# Altium footprint library SamacSys.PcbLib: 1008 footprints (part 5 of 63)
Each footprint in its own frame and in the unit in brackets; x right, y up, seen from the top. Pads: shape width x height; smd on the part's side, far side on the other; paste and mask are expansions set on the pad; w line width, h text height; cw(c..) or ccw(c..) is an arc to the next point about the centre after c.
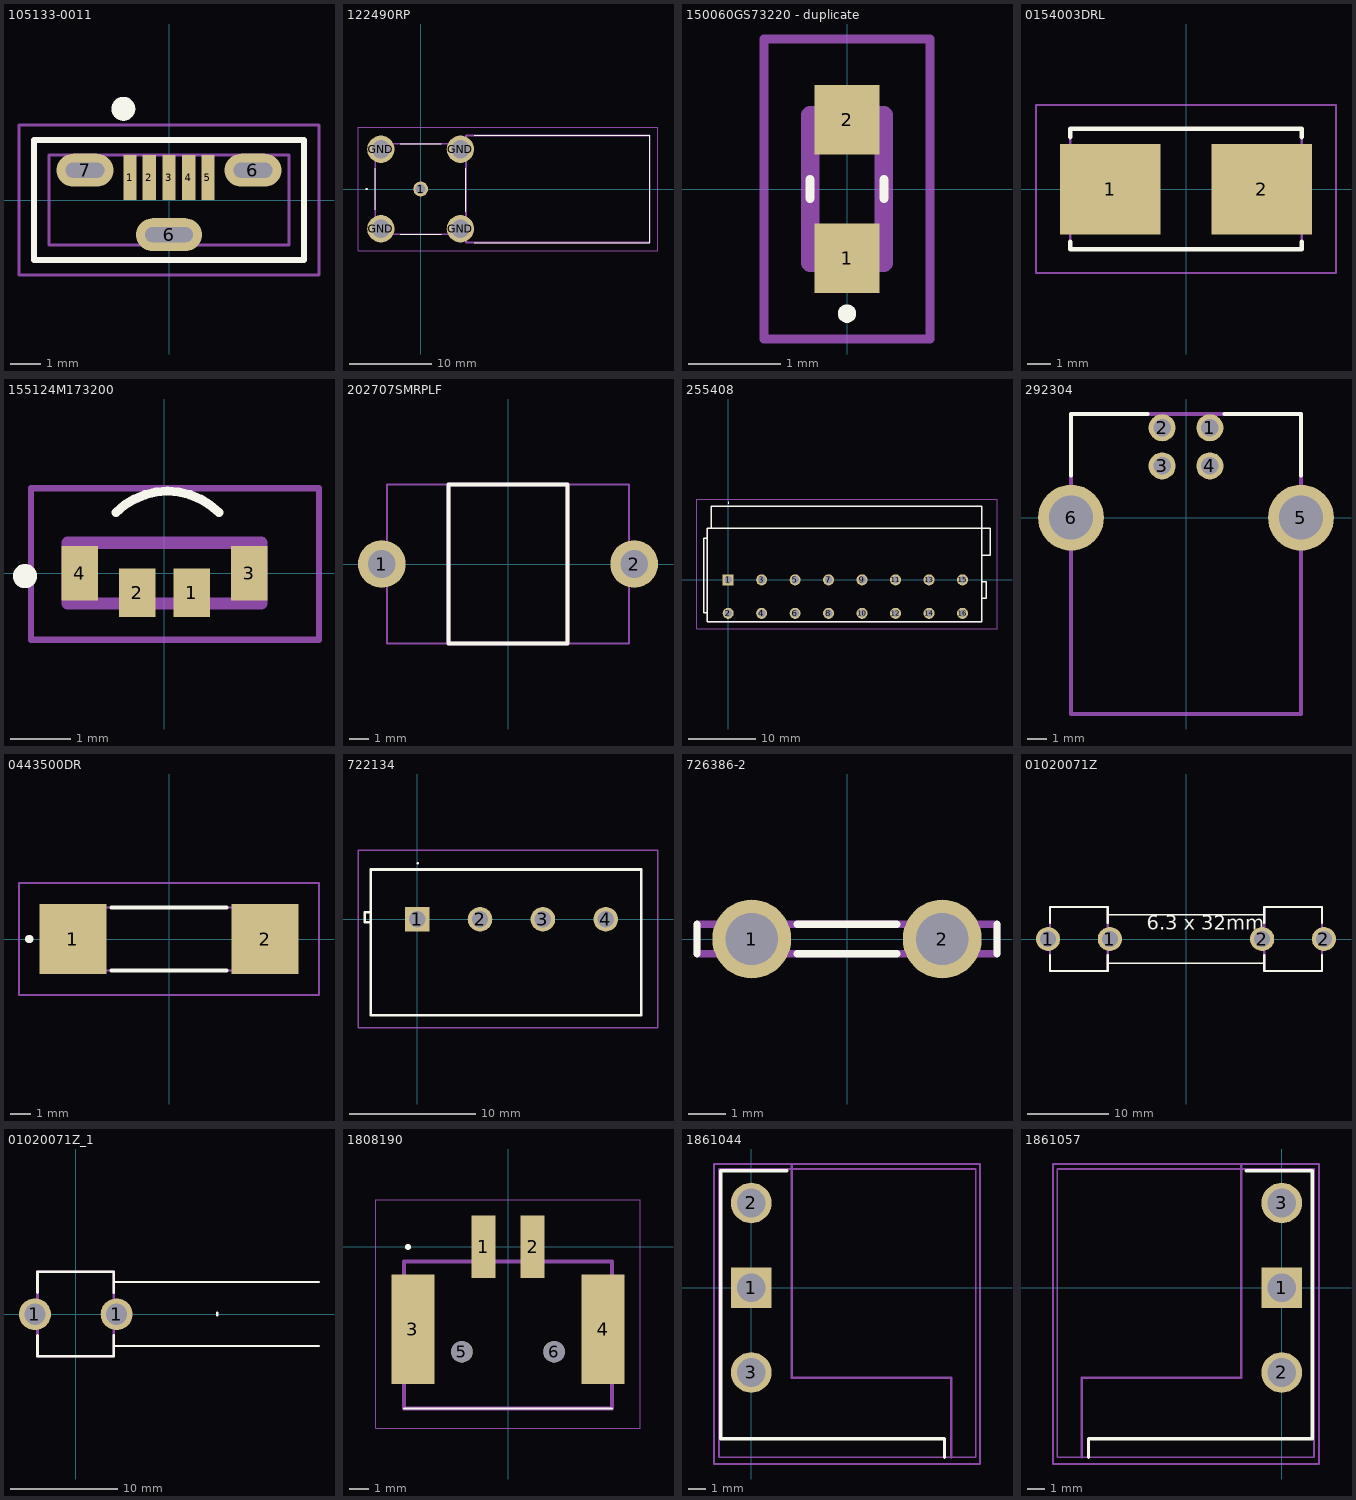
[diagram p4: the footprints below, top view; thin cyan lines are the x and y axes]

## 105133-0011 [mm] "Micro USB Vertical"
pads (8):
  rect 0.45x1.5 smd: 1(-1.3,0.75) 2(-0.65,0.75) 3(0,0.75) 4(0.65,0.75) 5(1.3,0.75)
  oval 2.2x1.1 hole 0.5 slot 1.6 at 0 deg: 6(0,-1.15)
  oval 1.9x1.1 hole 0.5 slot 1.3 at 0 deg: 6(2.8,1) 7(-2.8,1)
Top Overlay:
  circle w0.4: c-1.524,3.048 r0.2
  lines w0.2: -4.5,-2 4.5,-2 4.5,2 -4.5,2 -4.5,-2
Assembly:
  lines w0.1: -4,-1.5 -4,1.5 4,1.5 4,-1.5 -4,-1.5
Countryard:
  lines w0.1: -5,-2.5 -5,2.5 5,2.5 5,-2.5 -5,-2.5
3D body "105133-0011.stp": height 7.5, standoff -2.28, extent -4,-2.225 4,2.225

## 122490RP [mm]
pads (5):
  round 1.8 hole 1.2: 1(0,0)
  round 3.315 hole 2.21: GND(-4.825,-4.825) GND(-4.825,4.825) GND(4.825,-4.825) GND(4.825,4.825)
Top Overlay:
  lines w0.1: 5.5,-2.75 5.5,2.5 ; 5.5,-2.75 5.5,2.5 ; 5.5,-2.75 5.5,2.5 ; 5.5,-2.75 5.5,2.5 ; 27.8,-6.5 6.5,-6.5 27.8,-6.5 ; 27.8,-6.5 27.8,6.5 ; 27.8,-6.5 27.8,6.5 ; 27.8,6.5 6.5,6.5 27.8,6.5 ; -5.5,-2.5 -5.5,2.5 -5.5,-2.5 ; -2.5,-5.5 2.5,-5.5 -2.5,-5.5 ; -2.5,5.5 2.5,5.5 -2.5,5.5
  lines w0.2: -6.6,0 ccw(c-6.55,0) -6.5,0 ; -6.6,0 cw(c-6.55,0) -6.5,0 ; -6.6,0 ccw(c-6.55,0) -6.5,0
Assembly:
  lines w0.2: -5.5,-5.5 -5.5,5.5 5.5,5.5 5.5,-5.5 -5.5,-5.5 ; 5.5,-6.5 5.5,6.5 27.8,6.5 27.8,-6.5 5.5,-6.5
Countryard:
  lines w0.1: -7.6,-7.5 -7.6,7.5 28.8,7.5 28.8,-7.5 -7.6,-7.5
3D body "122490RP.stp": height 18.73, standoff -3.02, extent -5.499,-8.75 27.793,8.75

## 150060GS73220 - duplicate [mm]
pads (2):
  rect 0.7x0.75 smd: 1(0,-0.75) 2(0,0.75)
Top Overlay:
  lines w0.1: -0.4,-0.1 -0.4,0.1 ; 0.4,-0.1 0.4,0.1 ; -0.05,-1.35 cw(c0,-1.35) 0.05,-1.35 cw(c0,-1.35) -0.05,-1.35
Assembly:
  lines w0.2: -0.4,-0.8 -0.4,0.8 0.4,0.8 0.4,-0.8 -0.4,-0.8
Countryard:
  lines w0.1: -0.9,-1.625 -0.9,1.625 0.9,1.625 0.9,-1.625 -0.9,-1.625
3D body "150060GS73220.stp": height 0.4, standoff 0, extent -0.4,-0.8 0.4,0.8

## 0154003DRL [mm]
pads (2):
  rect 4.24x3.81 smd: 1(-3.185,0) 2(3.185,0)
Top Overlay:
  lines w0.2: -4.865,-2.2 -4.865,-2.515 4.865,-2.515 4.865,-2.2 ; -4.865,2.2 -4.865,2.55 4.865,2.55 4.865,2.2
Assembly:
  lines w0.1: -4.865,-2.515 -4.865,2.55 4.865,2.55 4.865,-2.515 -4.865,-2.515
Countryard:
  lines w0.1: -6.305,-3.515 -6.305,3.55 6.305,3.55 6.305,-3.515 -6.305,-3.515
3D body "0154003.DRL.stp": height 3.91, standoff 0, extent -4.924,-2.515 4.924,2.55

## 155124M173200 [mm]
pads (4):
  rect 0.6x0.8 smd: 1(0.45,-0.325) 2(-0.45,-0.325)
  rect 0.6x0.9 smd: 3(1.4,0) 4(-1.4,0)
Top Overlay:
  lines w0.15: -0.8,1 cw(c0.049,0.151) 0.897,1
  lines w0.2: -2.3,-0.15 cw(c-2.3,-0.05) -2.3,0.05 cw(c-2.3,-0.05) -2.3,-0.15
Assembly:
  lines w0.2: -1.6,-0.5 -1.6,0.5 1.6,0.5 1.6,-0.5 -1.6,-0.5
Countryard:
  lines w0.1: -2.2,-1.1 -2.2,1.4 2.55,1.4 2.55,-1.1 -2.2,-1.1
3D body "155124M173200.stp": height 0.98, standoff -0.02, extent -1.6,-0.3 1.6,1.2

## 202707SMRPLF [mm]
pads (2):
  round 2.4 hole 1.4 unplated: 1(-6.35,0) 2(6.35,0)
Top Overlay:
  lines w0.2: -3,-4 -3,4 3,4 3,-4 -3,-4
Assembly:
  lines w0.2: -3,-4 3,-4 3,4 -3,4 -3,-4
Countryard:
  lines w0.1: -6.1,-4 6.1,-4 6.1,4 -6.1,4 -6.1,-4
3D body "2027-xx-b10.stp": height 10, standoff -2.33, extent -6.387,-4 6.387,4

## 255408 [mm]
pads (16):
  rect 1.65x1.65 hole 1.1: 1(0,0)
  round 1.65 hole 1.1: 2(0,-5) 3(5,0) 4(5,-5) 5(10,0) 6(10,-5) 7(15,0) 8(15,-5) 9(20,0) 10(20,-5) 11(25,0) 12(25,-5) 13(30,0) 14(30,-5) 15(35,0) 16(35,-5)
Top Overlay:
  lines w0.1: 0,11.518 cw(c0.05,11.518) 0.1,11.518 cw(c0.05,11.518) 0,11.518
  lines w0.2: -3.15,-4.9 -3.65,-4.9 -3.65,6.2 -3.15,6.2 ; -2.525,7.7 -2.525,11.018 37.85,11.018 37.85,7.7 ; 37.85,-2.75 38.55,-2.75 38.55,-0.3 37.85,-0.3 ; 37.85,3.65 39.15,3.65 39.15,7.7 37.85,7.7 ; 37.85,7.7 37.85,-6.3 -3.15,-6.3 -3.15,7.7 37.85,7.7
Assembly:
  lines w0.1: -3.15,-6.3 -3.15,7.7 37.85,7.7 37.85,-6.3 -3.15,-6.3
Countryard:
  lines w0.1: -4.65,-7.3 -4.65,12.018 40.15,12.018 40.15,-7.3 -4.65,-7.3
3D body "255-408.stp": height 14.74, standoff -4, extent -3.65,-6.3 39.15,11.018

## 292304 [mm]
pads (6):
  round 1.42 hole 0.92: 1(1.25,4.71) 2(-1.25,4.71) 3(-1.25,2.71) 4(1.25,2.71)
  round 3.45 hole 2.3: 5(6.02,0) 6(-6.02,0)
Top Overlay:
  lines w0.2: -6.02,2.2 -6.02,5.43 -2,5.43 ; 2,5.43 6.02,5.43 6.02,2.2
Assembly:
  lines w0.2: -6.02,-10.28 6.02,-10.28 6.02,5.43 -6.02,5.43 -6.02,-10.28
3D body "292304-1.stp": height 11.53, standoff -3.89, extent -7.195,-10.27 7.195,5.43

## 0443500DR [mm]
pads (2):
  rect 3.25x3.43 smd: 1(-4.675,0) 2(4.675,0)
Top Overlay:
  lines w0.2: -2.8,-1.525 2.8,-1.525 ; -2.8,1.525 2.8,1.525 ; -6.8,-0.1 ccw(c-6.8,0) -6.8,0.1 ccw(c-6.8,0) -6.8,-0.1
Assembly:
  lines w0.1: -5.04,-1.525 -5.04,1.525 5.04,1.525 5.04,-1.525 -5.04,-1.525
Countryard:
  lines w0.1: -7.3,-2.715 -7.3,2.715 7.3,2.715 7.3,-2.715 -7.3,-2.715
3D body "0443001.stp": height 3.05, standoff 0, extent -5.04,-1.525 5.04,1.525

## 722134 [mm]
pads (4):
  rect 1.95x1.95 hole 1.3: 1(0,0)
  round 1.95 hole 1.3: 2(5,0) 3(10,0) 4(15,0)
Top Overlay:
  lines w0.1: 0,4.45 ccw(c0.05,4.45) 0.1,4.45 ccw(c0.05,4.45) 0,4.45
  lines w0.2: -3.8,-0.25 -4.15,-0.25 -4.15,0.55 -3.8,0.55 ; -3.7,-7.65 -3.7,3.95 17.8,3.95 17.8,-7.65 -3.7,-7.65
Assembly:
  lines w0.1: -3.7,-7.65 -3.7,3.95 17.8,3.95 17.8,-7.65 -3.7,-7.65
Countryard:
  lines w0.1: -4.7,-8.65 19.15,-8.65 19.15,5.5 -4.7,5.5 -4.7,-8.65
3D body "722-134.stp": height 18.25, standoff -5, extent -3.7,-7.69 17.8,3.91

## 726386-2 [mm]
pads (2):
  round 2.1 hole 1.4: 1(-2.54,0) 2(2.54,0)
Top Overlay:
  lines w0.2: -4,-0.4 -4,0.4 ; -1.33,-0.4 1.33,-0.4 ; -1.33,0.4 1.33,0.4 ; 4,-0.4 4,0.4
Assembly:
  lines w0.2: -4,-0.4 -4,0.4 4,0.4 4,-0.4 -4,-0.4
3D body "726386-2.stp": height 10.02, standoff -3.98, extent -4,-0.4 4,0.4

## 01020071Z [mm]
pads (4):
  round 2.98 hole 1.98: 1(-17.018,0) 1(-9.398,0) 2(9.398,0) 2(17.018,0)
Top Overlay:
  lines w0.2: -9.5,-3 9.5,-3 ; -9.5,3 9.5,3
  lines w0.254: -16.763,-2 -16.763,-3.935 -9.653,-3.935 -9.653,-2 ; -16.763,2 -16.763,3.935 -9.653,3.935 -9.653,2 ; 9.653,-2 9.653,-3.935 16.763,-3.935 16.763,-2 ; 9.653,2 9.653,3.935 16.763,3.935 16.763,2
  text "6.3 x 32mm" at -4.84,0.523 h3
Assembly:
  lines w0.254: -16.763,-3.935 -16.763,3.935 -9.653,3.935 -9.653,-3.935 -16.763,-3.935 ; 9.653,-3.935 9.653,3.935 16.763,3.935 16.763,-3.935 9.653,-3.935
3D body "01020071Z.stp": height 10.95, standoff -3.29, extent -17.258,-3.916 -9.148,3.916
3D body "01020071Z.stp": height 10.95, standoff -3.29, extent 9.154,-3.916 17.264,3.916

## 01020071Z_1 [mm]
pads (2):
  round 2.98 hole 1.98: 1(-3.81,0) 1(3.81,0)
Top Overlay:
  lines w0.2: 3.7,-2.975 22.7,-2.975 ; 3.7,3.025 22.7,3.025
  lines w0.254: -3.563,-1.975 -3.563,-3.91 3.547,-3.91 3.547,-1.975 ; -3.563,2.025 -3.563,3.96 3.547,3.96 3.547,2.025 ; 13.2,-0.075 13.2,0.125
Assembly:
  lines w0.254: -3.563,-3.91 -3.563,3.96 3.547,3.96 3.547,-3.91 -3.563,-3.91
3D body "01020071Z.stp": height 10.95, standoff -3.29, extent -4.058,-3.891 4.052,3.941

## 1808190 [mm]
pads (6):
  rect 1.2x3.2 smd: 1(-1.25,0) 2(1.25,0)
  rect 2.2x5.6 smd: 3(-4.85,-4.2) 4(4.85,-4.2)
  round 1.1 hole 1.1: 5(-2.35,-5.35) 6(2.35,-5.35)
Top Overlay:
  circle w0.2: c-5.1,0 r0.05
  lines w0.1: -5.3,-8.25 5.3,-8.25
Assembly:
  lines w0.2: -5.3,-8.25 -5.3,-0.75 5.3,-0.75 5.3,-8.25 -5.3,-8.25
Countryard:
  lines w0.05: -6.75,-9.25 -6.75,2.4 6.75,2.4 6.75,-9.25 -6.75,-9.25
3D body "1808190.stp": height 5, standoff 0, extent -5.3,-8.17 5.3,1.33

## 1861044 [mm]
pads (3):
  rect 2.4x2.4 hole 1.7: 1(0,0)
  round 2.4 hole 1.7: 2(0,5) 3(0,-5)
Top Overlay:
  lines w0.2: 2.1,6.9 -1.8,6.9 -1.8,-8.9 11.4,-8.9 11.4,-10
  text "." at -2.7,-0.2 h3
Assembly:
  lines w0.1: -1.9,-10 -1.9,7 13.25,7 13.25,-10 -1.9,-10
  lines w0.15: 2.4,7.2 2.4,-5.3 11.8,-5.3 11.8,-10
Countryard:
  lines w0.1: -2.2,-10.4 -2.2,7.3 13.5,7.3 13.5,-10.4 -2.2,-10.4
3D body "1861044.stp": height 6.02, standoff -3.92, extent -7.318,-14.938 15.768,9.25

## 1861057 [mm]
pads (3):
  rect 2.4x2.4 hole 1.7: 1(0,0)
  round 2.4 hole 1.7: 2(0,-5) 3(0,5)
Top Overlay:
  lines w0.2: -11.4,-10 -11.4,-8.9 1.8,-8.9 1.8,6.9 -2.1,6.9
  text "." at 2.7,-0.2 h3
Assembly:
  lines w0.1: -13.25,-10 1.9,-10 1.9,7 -13.25,7 -13.25,-10
  lines w0.15: -11.8,-10 -11.8,-5.3 -2.4,-5.3 -2.4,7.2
Countryard:
  lines w0.1: -13.5,-10.4 2.2,-10.4 2.2,7.3 -13.5,7.3 -13.5,-10.4
3D body "1861057.stp": height 6.02, standoff -3.92, extent -15.743,-14.938 7.343,9.25